# Altium footprint library IC_DIP.PcbLib: 21 footprints (part 2 of 2)
Each footprint in its own frame and in the unit in brackets; x right, y up, seen from the top. Pads: shape width x height; smd on the part's side, far side on the other; paste and mask are expansions set on the pad; w line width, h text height; cw(c..) or ccw(c..) is an arc to the next point about the centre after c.
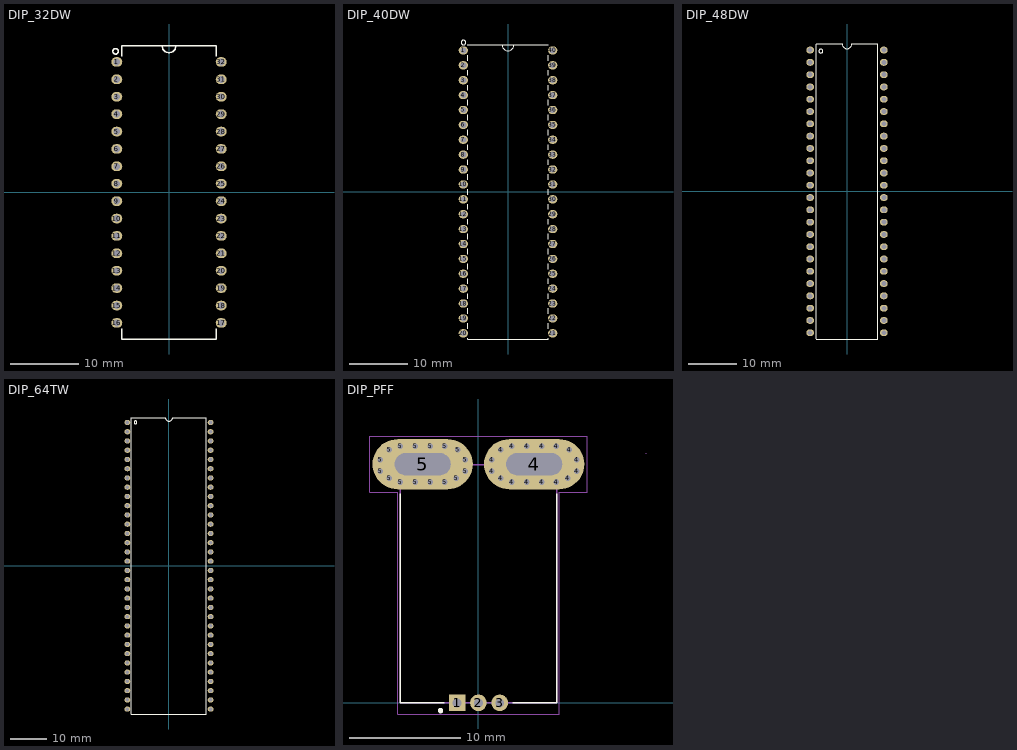
[diagram p1: the footprints below, top view; thin cyan lines are the x and y axes]

## DIP_32DW [mm] "DIP, pitch 2.54mm, 600mil Width"
pads (32):
  oval 1.6x1.4 / inner round 1.4 / far side oval 2.2x1.4 hole 1: 1(-7.62,19.05) 2(-7.62,16.51) 3(-7.62,13.97) 4(-7.62,11.43) 5(-7.62,8.89) 6(-7.62,6.35) 7(-7.62,3.81) 8(-7.62,1.27) 9(-7.62,-1.27) 10(-7.62,-3.81) 11(-7.62,-6.35) 12(-7.62,-8.89) 13(-7.62,-11.43) 14(-7.62,-13.97) 15(-7.62,-16.51) 16(-7.62,-19.05) 17(7.62,-19.05) 18(7.62,-16.51) 19(7.62,-13.97) 20(7.62,-11.43) 21(7.62,-8.89) 22(7.62,-6.35) 23(7.62,-3.81) 24(7.62,-1.27) 25(7.62,1.27) 26(7.62,3.81) 27(7.62,6.35) 28(7.62,8.89) 29(7.62,11.43) 30(7.62,13.97) 31(7.62,16.51) 32(7.62,19.05)
Top Overlay:
  circle w0.2: c-7.8,20.6 r0.4
  lines w0.2: -6.9,-19.9 -6.9,-21.4 6.9,-21.4 6.9,-19.9 ; -6.9,19.9 -6.9,21.4 6.9,21.4 6.9,19.9 ; -1,21.4 ccw(c0,21.4) 1,21.4
Top Designator:
  text ".Designator" at -3.71,-0.344 h1.52

## DIP_40DW [mm] "DIP, pitch 2.54mm, 600mil Width"
pads (40):
  oval 1.6x1.4 / inner round 1.4 / far side oval 2.2x1.4 hole 1: 1(-7.62,24.13) 2(-7.62,21.59) 3(-7.62,19.05) 4(-7.62,16.51) 5(-7.62,13.97) 6(-7.62,11.43) 7(-7.62,8.89) 8(-7.62,6.35) 9(-7.62,3.81) 10(-7.62,1.27) 11(-7.62,-1.27) 12(-7.62,-3.81) 13(-7.62,-6.35) 14(-7.62,-8.89) 15(-7.62,-11.43) 16(-7.62,-13.97) 17(-7.62,-16.51) 18(-7.62,-19.05) 19(-7.62,-21.59) 20(-7.62,-24.13) 21(7.62,-24.13) 22(7.62,-21.59) 23(7.62,-19.05) 24(7.62,-16.51) 25(7.62,-13.97) 26(7.62,-11.43) 27(7.62,-8.89) 28(7.62,-6.35) 29(7.62,-3.81) 30(7.62,-1.27) 31(7.62,1.27) 32(7.62,3.81) 33(7.62,6.35) 34(7.62,8.89) 35(7.62,11.43) 36(7.62,13.97) 37(7.62,16.51) 38(7.62,19.05) 39(7.62,21.59) 40(7.62,24.13)
Top Overlay:
  circle w0.2: c-7.6,25.48 r0.4
  lines w0.2: -6.9,-24.98 -6.9,-25.1 6.9,-25.1 6.9,-24.98 ; -6.9,-23.32 -6.9,-22.42 ; -6.9,-20.78 -6.9,-19.88 ; -6.9,-18.24 -6.9,-17.34 ; -6.9,-15.7 -6.9,-14.8 ; -6.9,-13.16 -6.9,-12.26 ; -6.9,-10.62 -6.9,-9.72 ; -6.9,-8.08 -6.9,-7.18 ; -6.9,-5.54 -6.9,-4.64 ; -6.9,-3 -6.9,-2.1 ; -6.9,-0.46 -6.9,0.44 ; -6.9,2.08 -6.9,2.98 ; -6.9,4.62 -6.9,5.52 ; -6.9,7.16 -6.9,8.06 ; -6.9,9.7 -6.9,10.6 ; -6.9,12.24 -6.9,13.14 ; -6.9,14.78 -6.9,15.68 ; -6.9,17.32 -6.9,18.22 ; -6.9,19.86 -6.9,20.76 ; -6.9,22.4 -6.9,23.3 ; -6.9,24.98 -6.9,25.1 6.9,25.1 6.9,24.98 ; -1,25.08 ccw(c0,25.08) 1,25.08 ; 6.9,-23.32 6.9,-22.42 ; 6.9,-20.78 6.9,-19.88 ; 6.9,-18.24 6.9,-17.34 ; 6.9,-15.7 6.9,-14.8 ; 6.9,-13.16 6.9,-12.26 ; 6.9,-10.62 6.9,-9.72 ; 6.9,-8.08 6.9,-7.18 ; 6.9,-5.54 6.9,-4.64 ; 6.9,-3 6.9,-2.1 ; 6.9,-0.46 6.9,0.44 ; 6.9,2.08 6.9,2.98 ; 6.9,4.62 6.9,5.52 ; 6.9,7.16 6.9,8.06 ; 6.9,9.7 6.9,10.6 ; 6.9,12.24 6.9,13.14 ; 6.9,14.78 6.9,15.68 ; 6.9,17.32 6.9,18.22 ; 6.9,19.86 6.9,20.76 ; 6.9,22.4 6.9,23.3
Top Designator:
  text ".Designator" at -3.71,0.046 h1.52
3D body "DIP40-600-metric.step": height 5.5, standoff -3.9, extent -7.65,-25 7.65,25

## DIP_48DW [mm] "DIP, pitch 2.54mm, 600mil Width"
pads (48):
  oval 1.6x1.4 / inner round 1.4 / far side oval 2.2x1.4 hole 1: 1(-7.62,29.21) 2(-7.62,26.67) 3(-7.62,24.13) 4(-7.62,21.59) 5(-7.62,19.05) 6(-7.62,16.51) 7(-7.62,13.97) 8(-7.62,11.43) 9(-7.62,8.89) 10(-7.62,6.35) 11(-7.62,3.81) 12(-7.62,1.27) 13(-7.62,-1.27) 14(-7.62,-3.81) 15(-7.62,-6.35) 16(-7.62,-8.89) 17(-7.62,-11.43) 18(-7.62,-13.97) 19(-7.62,-16.51) 20(-7.62,-19.05) 21(-7.62,-21.59) 22(-7.62,-24.13) 23(-7.62,-26.67) 24(-7.62,-29.21) 25(7.62,-29.21) 26(7.62,-26.67) 27(7.62,-24.13) 28(7.62,-21.59) 29(7.62,-19.05) 30(7.62,-16.51) 31(7.62,-13.97) 32(7.62,-11.43) 33(7.62,-8.89) 34(7.62,-6.35) 35(7.62,-3.81) 36(7.62,-1.27) 37(7.62,1.27) 38(7.62,3.81) 39(7.62,6.35) 40(7.62,8.89) 41(7.62,11.43) 42(7.62,13.97) 43(7.62,16.51) 44(7.62,19.05) 45(7.62,21.59) 46(7.62,24.13) 47(7.62,26.67) 48(7.62,29.21)
Top Overlay:
  circle w0.2: c-5.4,29 r0.4
  lines w0.2: -6.4,-30.5 6.4,-30.5 ; -6.4,-30.4 -6.4,30.4 ; -6.4,30.5 -1,30.5 ccw(c0,30.5) 1,30.5 6.4,30.5 ; 6.4,-30.4 6.4,30.4
Top Designator:
  text ".Designator" at -3.71,-0.344 h1.52

## DIP_64TW [mm] "DIP, pitch 2.54mm, 900mil Width"
pads (64):
  oval 1.6x1.4 / inner round 1.4 / far side oval 2.2x1.4 hole 1: 1(-11.43,39.37) 2(-11.43,36.83) 3(-11.43,34.29) 4(-11.43,31.75) 5(-11.43,29.21) 6(-11.43,26.67) 7(-11.43,24.13) 8(-11.43,21.59) 9(-11.43,19.05) 10(-11.43,16.51) 11(-11.43,13.97) 12(-11.43,11.43) 13(-11.43,8.89) 14(-11.43,6.35) 15(-11.43,3.81) 16(-11.43,1.27) 17(-11.43,-1.27) 18(-11.43,-3.81) 19(-11.43,-6.35) 20(-11.43,-8.89) 21(-11.43,-11.43) 22(-11.43,-13.97) 23(-11.43,-16.51) 24(-11.43,-19.05) 25(-11.43,-21.59) 26(-11.43,-24.13) 27(-11.43,-26.67) 28(-11.43,-29.21) 29(-11.43,-31.75) 30(-11.43,-34.29) 31(-11.43,-36.83) 32(-11.43,-39.37) 33(11.43,-39.37) 34(11.43,-36.83) 35(11.43,-34.29) 36(11.43,-31.75) 37(11.43,-29.21) 38(11.43,-26.67) 39(11.43,-24.13) 40(11.43,-21.59) 41(11.43,-19.05) 42(11.43,-16.51) 43(11.43,-13.97) 44(11.43,-11.43) 45(11.43,-8.89) 46(11.43,-6.35) 47(11.43,-3.81) 48(11.43,-1.27) 49(11.43,1.27) 50(11.43,3.81) 51(11.43,6.35) 52(11.43,8.89) 53(11.43,11.43) 54(11.43,13.97) 55(11.43,16.51) 56(11.43,19.05) 57(11.43,21.59) 58(11.43,24.13) 59(11.43,26.67) 60(11.43,29.21) 61(11.43,31.75) 62(11.43,34.29) 63(11.43,36.83) 64(11.43,39.37)
Top Overlay:
  circle w0.2: c-9.2,39.4 r0.4
  lines w0.2: -10.3,-40.7 -10.3,40.7 -1,40.7 ccw(c0,40.7) 1,40.7 10.3,40.7 10.3,-40.7 -10.3,-40.7
Top Designator:
  text ".Designator" at -3.71,-0.344 h1.52

## DIP_PFF [mm]
pads (37):
  rect 1.5x1.5 hole 0.8: 1(-1.91,0)
  round 1.5 hole 0.8: 2(0,0) 3(1.91,0)
  round 0.8 hole 0.5: 4(1.2,20.75) 4(1.2,21.8) 4(2,20.13) 4(2,22.7) 4(3,19.8) 4(3,23) 4(4.33,19.8) 4(4.33,23) 4(5.66,19.8) 4(5.66,23) 4(6.99,19.8) 4(6.99,23) 4(8,20.13) 4(8.15,22.7) 4(8.8,20.75) 4(8.8,21.8) 5(-8.8,20.75) 5(-8.8,21.8) 5(-8,20.13) 5(-8,22.7) 5(-7,19.8) 5(-7,23) 5(-5.67,19.8) 5(-5.67,23) 5(-4.34,19.8) 5(-4.34,23) 5(-3.01,19.8) 5(-3.01,23) 5(-2,20.13) 5(-1.85,22.7) 5(-1.2,20.75) 5(-1.2,21.8)
  oval 9x4.5 hole 2 slot 5 at 0 deg: 4(5,21.4) 5(-5,21.4)
Top Overlay:
  circle w0.24: c-3.4,-0.7 r0.12
  lines w0.127: -7,18.76 -7,0 -3.06,0 ; 3.06,0 7,0 7,18.74
Mechanical 1:
  lines w0: -5,22.4 -4.95,22.4 ; 5,22.4 5.05,22.4 ; 15,22.4 15.05,22.4 ; -7,20.4 cw(c-7,21.4) -7,22.4 -3,22.4 cw(c-3,21.4) -3,20.4 -7,20.4 ; 3,20.4 cw(c3,21.4) 3,22.4 7,22.4 cw(c7,21.4) 7,20.4 3,20.4
Mechanical 13:
  lines w0.127: -7,0 7,0 7,21.341 -7,21.341 -7,0
Mechanical 15:
  lines w0.05: -9.75,18.9 -9.75,23.9 9.75,23.9 9.75,18.9 7.25,18.9 7.25,-1 -7.25,-1 -7.25,18.9 -9.75,18.9
3D body "ACS758.STEP": height 7, standoff -3.5, extent -7.127,-0.071 6.873,22.279